# Altium schematic symbol library Schlib1.SchLib: 5 symbols
Pins are listed as number, name and electrical type; pins without a type are passive.

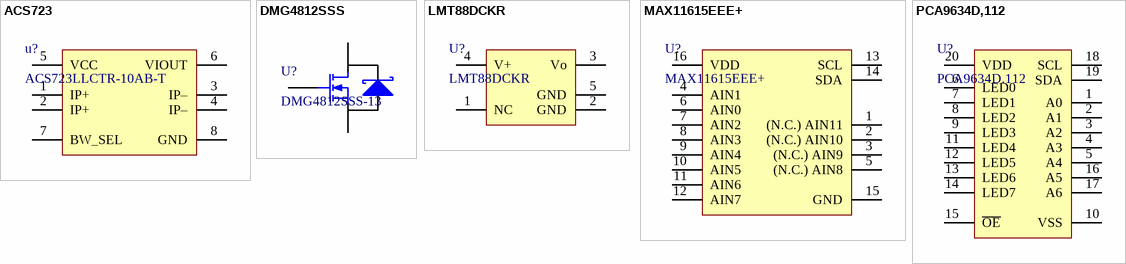
[diagram p0: symbols ACS723 to PCA9634D,112]

## ACS723
designator u?, comment ACS723LLCTR-10AB-T
HIGH ACCURACY 3.3V OPTIMIZED CURRENT SENSOR IC ;ROHS COMPLIANT: YES; Manufacturer: Allegro MicroSystems; Number of Channels: 1; Frequency: 80kHz; Response Time: 5us; Max Supply Current: 14mA; Polarity: Bidirectional; Linearity: 1%; Accuracy: 3%; Current Sensing: 10A; Sensitivity: 200mV/A; Max Input Voltage: 5.5V; Min Input Voltage: 4.5V; Supplier 1: Digi-Key; Manufacturer Part Number: ACS723LLCTR-10AB-T; Stock 1: 9704; Pricing 1: 1=5.54, 5=4.886, 10=4.316, 25=3.5012, 50=3.0942, 100=3.0128, 500=2.52426, 1000=2.3614 (USD); Mount: Surface Mount; Case/Package: SOIC; Number of Pins: 8; Min Operating Temperature: -40°C; Max Operating Temperature: 150°C; Packaging: Tape and Reel; Length: 4.9mm; Height: 1.5mm; Width: 3.9mm; Supplier Part Number 1: 620-1642-1-ND
footprint ACS723
pins: 1 IP+, 2 IP+, 3 IP–, 4 IP–, 5 VCC, 6 VIOUT, 7 BW_SEL, 8 GND

## DMG4812SSS
designator U?, comment DMG4812SSS-13
MOSFET N-CH 30V 8A SO-8; Manufacturer: Diodes; Rds On Max: 15mR; Input Capacitance: 1.849nF; Rise Time: 8.73ns; Max Power Dissipation: 1.54W; Turn-On Delay Time: 6.62ns; Turn-Off Delay Time: 36.41ns; Fall Time: 4.69ns; Gate to Source Voltage (Vgs): 12V; Supplier 1: Digi-Key; Manufacturer Part Number: DMG4812SSS-13; Stock 1: 4210; Pricing 1: 1=0.59, 10=0.499, 100=0.3739, 500=0.27418, 1000=0.21187 (USD); Mount: Surface Mount; Case/Package: SO; Number of Pins: 8; Min Operating Temperature: -55°C; Max Operating Temperature: 150°C; Packaging: Tape and Reel; Package Quantity: 2500; Continuous Drain Current (ID): 8A; Drain to Source Voltage (Vdss): 30V; REACH SVHC: No SVHC; Supplier Part Number 1: DMG4812SSS-13DICT-ND
footprint DMG4812SSS
pins: 1 D, 2 G, 3 S

## LMT88DCKR
designator U?
Temp Sensor Analog 5-Pin SC-70 T/R; Manufacturer: Texas Instruments; Max Supply Voltage: 5.5V; Min Supply Voltage: 2.4V; Output Current: 10mA; Nominal Supply Current: 4.5uA; Output Type: Analog,Analog Voltage; Supplier 1: Digi-Key; Manufacturer Part Number: LMT88DCKR; Stock 1: 21268; Pricing 1: 1=0.71, 10=0.59, 25=0.5184, 100=0.3669, 250=0.33496, 500=0.319, 1000=0.27913 (USD); Mount: Surface Mount; Case/Package: SC; Number of Pins: 70; Min Operating Temperature: -55°C; Max Operating Temperature: 130°C; Packaging: Tape and Reel; Package Quantity: 3000; Quiescent Current: 4.5uA; Interface: Analog; Radiation Hardening: No; Lead Free: Lead Free; Supplier Part Number 1: 296-38167-6-ND
footprint LMT88DCKR (SENSOR ANALOG -55C-130C SC70-5)
pins: 1 NC, 2 GND, 3 Vo, 4 V+, 5 GND

## MAX11615EEE+
designator U?
IC ADC SERIAL 12BIT 8CH 16-QSOP; Manufacturer: Maxim; Sampling Rate: 94.4KS/s; Number of A/D Converters: 1; Interface: I2C,Serial; Resolution: 12b; Polarity: Bipolar,Unipolar; Number of Bits: 12; Max Power Dissipation: 666.7mW; Signal to Noise Ratio (SNR): 70dB; Min Supply Voltage: 2.7V; Max Supply Voltage: 3.6V; Supply Type: Single; Integral Nonlinearity (INL): 1LSB; Nominal Supply Current: 670uA; Supplier 1: Digi-Key; Manufacturer Part Number: MAX11615EEE+; Stock 1: 618; Pricing 1: 1=3.5, 10=3.42 (USD); Mount: Surface Mount; Case/Package: QSOP; Number of Pins: 16; Min Operating Temperature: -40°C; Max Operating Temperature: 85°C; Packaging: Rail/Tube; Package Quantity: 100; Number of Converters: 1; Conversion Rate: 94.4KS/s; Length: 4.98mm; Height: 1.651mm; Width: 3.99mm; Radiation Hardening: No; REACH SVHC: Unknown; Supplier Part Number 1: MAX11615EEE+-ND
footprint MAX11615EEE+
pins: 1 (N.C.) AIN11, 2 (N.C.) AIN10, 3 (N.C.) AIN9, 4 AIN1, 5 (N.C.) AIN8, 6 AIN0, 7 AIN2, 8 AIN3, 9 AIN4, 10 AIN5, 11 AIN6, 12 AIN7, 13 SCL, 14 SDA, 15 GND, 16 VDD

## PCA9634D,112
designator U?, comment PCA9634D.112
LED DRVR 16Segment 2.5V/3.3V/5V 20-Pin SO; Manufacturer: NXP Semiconductors; Supplier 1: Digi-Key; Manufacturer Part Number: PCA9634D.112; Stock 1: 837; Pricing 1: 1=1.49, 10=1.338, 100=1.0757, 500=0.88376 (USD); Number of Pins: 20; Packaging: Rail/Tube; Lead Free: Lead Free; Supplier Part Number 1: 568-8365-5-ND
pins: 1 A0, 2 A1, 3 A2, 4 A3, 5 A4, 6 LED0, 7 LED1, 8 LED2, 9 LED3, 10 VSS, 11 LED4, 12 LED5, 13 LED6, 14 LED7, 15 ~{OE}, 16 A5, 17 A6, 18 SCL, 19 SDA, 20 VDD